# Altium footprint library Capacitance.PcbLib: 69 footprints (part 3 of 5)
Each footprint in its own frame and in the unit in brackets; x right, y up, seen from the top. Pads: shape width x height; smd on the part's side, far side on the other; paste and mask are expansions set on the pad; w line width, h text height; cw(c..) or ccw(c..) is an arc to the next point about the centre after c.
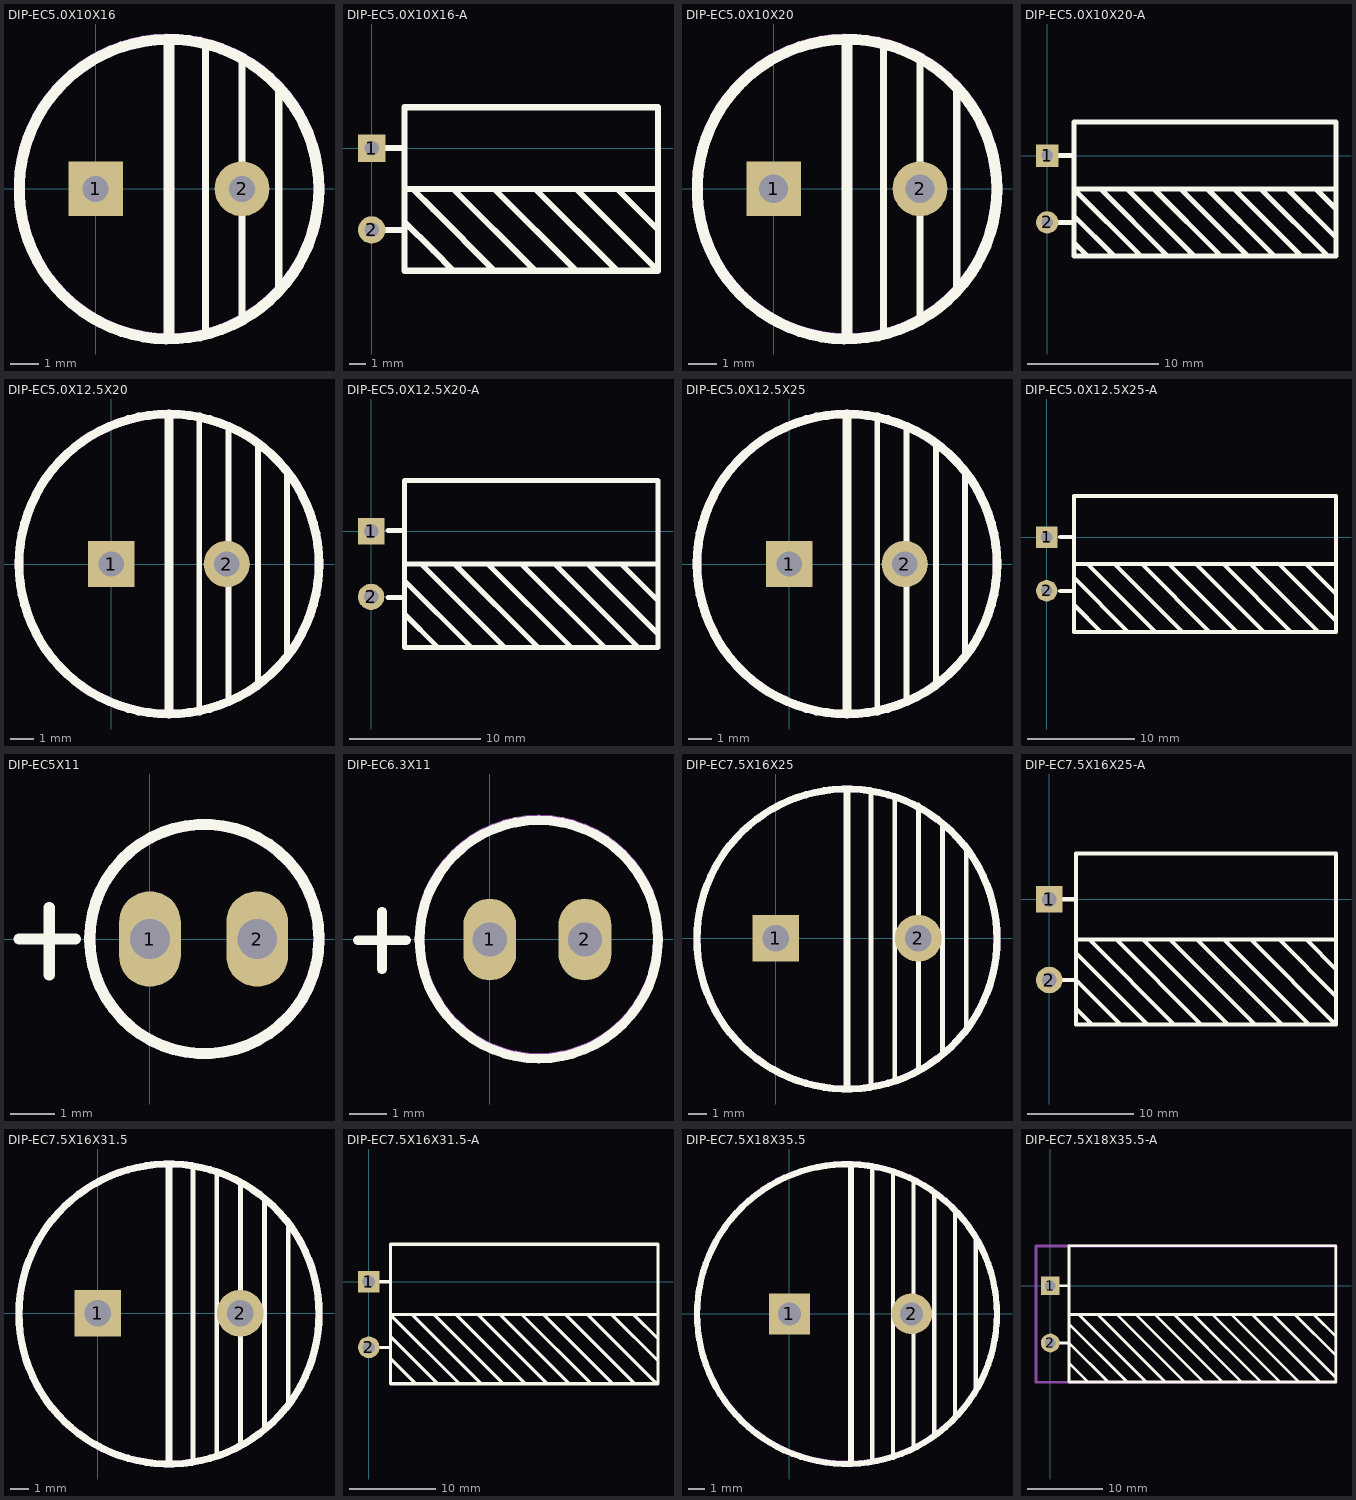
[diagram p2: the footprints below, top view; thin cyan lines are the x and y axes]

## DIP-EC5.0X10X16 [mm]
pads (2):
  rect 1.9x1.9 hole 0.9: 1(0,0)
  round 1.9 hole 0.9: 2(5.08,0)
Top Overlay:
  circle w0.381: c2.546,-0.013 r5.2
  lines w0.254: 3.81,-5.08 3.81,5.08 ; 5.08,-4.572 5.08,4.572 ; 6.35,-3.556 6.35,3.556
  lines w0.381: 2.546,-5.197 2.546,5.072 ; 2.546,-5.082 2.546,-5.075 ; 2.546,-4.07 2.546,-4.064 ; 2.546,-3.054 2.546,-3.05 2.546,-3.043 ; 2.546,-2.032 2.546,-2.038 ; 2.546,1.01 2.546,1.016 ; 2.546,2.026 2.546,2.032 ; 2.546,4.058 2.546,4.064 ; 2.546,5.074 2.546,5.187 ; 2.546,-2.038 2.546,-2.038
Bottom Courtyard:
  circle w0.381: c2.546,0 r5.2
  text ".Designator" at 10.163,-0.514 h1.52
3D body "CAP 5.0X10X16.STEP": height 16.04, standoff -3.37, extent -2.413,-4.998 7.597,4.998

## DIP-EC5.0X10X16-A [mm]
pads (2):
  rect 1.7x1.7 hole 0.9: 1(0,0)
  round 1.7 hole 0.9: 2(0,-5.08)
Top Overlay:
  lines w0.381: 0.762,-5.08 1.778,-5.08 2.032,-5.08 ; 0.762,0 1.778,0 2.032,0 ; 2.032,-4.572 3.81,-6.35 5.08,-7.62 ; 2.032,-2.54 2.54,-2.54 ; 3.81,-2.54 17.78,-2.54 ; 4.064,-2.54 2.54,-2.54 ; 5.08,-2.54 10.16,-7.62 ; 7.62,-7.62 3.81,-3.81 2.54,-2.54 ; 7.62,-2.54 12.7,-7.62 ; 10.16,-2.54 15.24,-7.62 ; 12.7,-2.54 17.78,-7.62 ; 15.24,-2.54 17.78,-5.08 ; 17.78,-7.62 17.78,2.54 2.032,2.54 2.032,-7.62 17.78,-7.62
Bottom Courtyard:
  text ".Designator" at 16.127,-3.048 h1.52
3D body "CAP 5.0X10X16-H.STEP": height 10.03, standoff -3.47, extent -0.254,-7.545 17.956,2.465

## DIP-EC5.0X10X20 [mm]
pads (2):
  rect 1.9x1.9 hole 1: 1(0,0)
  round 1.9 hole 1: 2(5.08,0)
Top Overlay:
  circle w0.381: c2.546,-0.013 r5.2
  lines w0.254: 3.81,-5.08 3.81,4.826 ; 5.08,-4.572 5.08,4.572 ; 6.35,-3.556 6.35,3.556
  lines w0.381: 2.546,-5.197 2.546,5.072 ; 2.546,-5.082 2.546,-5.075 ; 2.546,-4.07 2.546,-4.064 ; 2.546,-3.054 2.546,-3.05 2.546,-3.043 ; 2.546,-2.032 2.546,-2.038 ; 2.546,2.026 2.546,2.032 ; 2.546,4.058 2.546,4.064 ; 2.546,5.074 2.546,5.187 ; 2.546,-2.038 2.546,-2.038
Bottom Courtyard:
  circle w0.381: c2.546,0 r5.2
  text ".Designator" at 10.163,-0.514 h1.52
3D body "CAP 5.0X10X20.STEP": height 20.03, standoff -3.38, extent -2.459,-4.926 7.551,5.074

## DIP-EC5.0X10X20-A [mm]
pads (2):
  rect 1.7x1.7 hole 0.9: 1(0,0)
  round 1.7 hole 0.9: 2(0,-5.08)
Top Overlay:
  lines w0.381: 0.762,-5.08 1.778,-5.08 2.032,-5.08 ; 0.762,0 1.778,0 2.032,0 ; 2.032,-6.604 3.048,-7.62 ; 2.032,-4.572 5.08,-7.62 ; 3.81,-2.54 21.971,-2.54 ; 6.096,-2.54 11.176,-7.62 ; 7.112,-7.62 2.032,-2.54 ; 8.128,-2.54 13.208,-7.62 ; 9.144,-7.62 4.064,-2.54 2.54,-2.54 2.032,-2.54 ; 9.652,-2.54 10.16,-2.54 15.24,-7.62 ; 12.192,-2.54 17.272,-7.62 ; 14.224,-2.54 19.304,-7.62 ; 16.256,-2.54 21.336,-7.62 ; 18.288,-2.54 21.844,-6.096 ; 20.32,-2.54 20.447,-2.54 21.971,-4.064 ; 2.032,-2.54 2.032,-2.54 ; 2.032,-7.62 2.032,2.54 21.971,2.54 21.971,-7.62 2.032,-7.62
Bottom Courtyard:
  text ".Designator" at 18.222,-3.048 h1.52
3D body "CAP 5.0X10X20-H.STEP": height 10.03, standoff -3.47, extent -0.254,-7.545 21.956,2.465

## DIP-EC5.0X12.5X20 [mm]
pads (2):
  rect 2x2 hole 1.1: 1(0,0)
  round 2 hole 1.1: 2(5,0)
Top Overlay:
  circle w0.381: c2.5,0 r6.5
  lines w0.254: 3.81,-6.35 3.81,6.35 ; 5.08,-5.842 5.08,5.842 ; 6.35,-5.334 6.35,5.08 ; 7.62,-4.064 7.62,4.064
  lines w0.381: 2.5,-5.842 2.5,-6.35 2.5,6.35 ; 2.5,-5.08 2.5,-3.81 ; 2.5,-2.54 2.5,-1.778 ; 2.5,1.016 2.5,2.286 ; 2.5,3.048 2.5,4.064
Bottom Courtyard:
  circle w0.381: c2.5,0 r6.5
  text ".Designator" at 10.118,-0.508 h1.52
3D body "CAP 5.0X12.5X20.STEP": height 20.03, standoff -3.38, extent -3.81,-6.25 8.7,6.25

## DIP-EC5.0X12.5X20-A [mm]
pads (2):
  rect 2x2 hole 1.1: 1(0,0)
  round 2 hole 1.1: 2(0,-5)
Top Overlay:
  lines w0.381: 1.27,-5.04 2.54,-5.04 ; 1.27,0.04 2.54,0.04 ; 2.54,-6.31 5.08,-8.85 ; 2.54,-3.77 7.62,-8.85 ; 2.54,-2.5 21.844,-2.5 ; 3.81,-2.5 10.16,-8.85 ; 6.35,-2.5 12.7,-8.85 ; 8.89,-2.5 15.24,-8.85 ; 11.43,-2.5 17.78,-8.85 ; 13.97,-2.5 20.32,-8.85 ; 16.51,-2.5 21.844,-7.834 ; 19.05,-2.5 21.844,-5.294 ; 2.54,-8.85 21.844,-8.85 21.844,3.85 2.54,3.85 2.54,-8.85
Bottom Courtyard:
  text ".Designator" at 18.084,-3.008 h1.52
3D body "CAP 5.0X12.5X20-H.STEP": height 12.53, standoff -3.47, extent -0.381,-8.668 21.829,3.842

## DIP-EC5.0X12.5X25 [mm]
pads (2):
  rect 2x2 hole 1.1: 1(0,0)
  round 2 hole 1.1: 2(5,0)
Top Overlay:
  circle w0.381: c2.5,0 r6.5
  lines w0.254: 3.81,-6.35 3.81,6.35 ; 5.08,-5.842 5.08,5.842 ; 6.35,-5.334 6.35,5.08 ; 7.62,-4.064 7.62,4.064
  lines w0.381: 2.5,-5.842 2.5,-6.35 2.5,6.35 ; 2.5,-5.08 2.5,-3.81 ; 2.5,-2.54 2.5,-1.778 ; 2.5,1.016 2.5,2.286 ; 2.5,3.048 2.5,4.064
Bottom Courtyard:
  circle w0.381: c2.5,0 r6.5
  text ".Designator" at 10.118,-0.508 h1.52
3D body "CAP 5.0X12.5X25.STEP": height 25.04, standoff -3.37, extent -3.81,-6.248 8.7,6.248

## DIP-EC5.0X12.5X25-A [mm]
pads (2):
  rect 2x2 hole 1.1: 1(0,0)
  round 2 hole 1.1: 2(0,-5)
Top Overlay:
  lines w0.381: 1.27,-5.04 2.54,-5.04 ; 1.27,0.04 2.54,0.04 ; 2.54,-6.31 5.08,-8.85 ; 2.54,-3.77 7.62,-8.85 ; 2.54,-2.5 27.051,-2.5 ; 3.81,-2.5 10.16,-8.85 ; 6.35,-2.5 12.7,-8.85 ; 8.89,-2.5 15.24,-8.85 ; 11.43,-2.5 17.78,-8.85 ; 13.97,-2.5 20.32,-8.85 ; 16.51,-2.5 22.86,-8.85 ; 19.05,-2.5 25.4,-8.85 ; 21.717,-2.5 27.051,-7.834 ; 24.257,-2.5 27.051,-5.294 ; 2.54,-8.85 27.051,-8.85 27.051,3.85 2.54,3.85 2.54,-8.85
Bottom Courtyard:
  text ".Designator" at 20.687,-3.008 h1.52
3D body "CAP 5.0X12.5X25-H.STEP": height 12.53, standoff -3.47, extent -0.381,-8.795 26.829,3.715

## DIP-EC5X11 [mil]
pads (2):
  oval 55x85 hole 35.43: 1(0,0) 2(95.5,0)
Top Overlay:
  circle w10: c48.5,0 r102.02
  lines w10: -116.5,0 -66.5,0 ; -89.5,-32 -89.5,28
Bottom Courtyard:
  circle w10: c48.5,0 r102.02
  text ".Designator" at 317.54,-22.11 h60
3D body "CAP_5×11.STEP": height 491.5, standoff -158.11, extent -59.77,-111.24 156.77,105.24

## DIP-EC6.3X11 [mil]
pads (2):
  oval 55x85 hole 35.43: 1(0,0) 2(99,0)
Top Overlay:
  circle w10: c51,0 r124.02
  lines w10: -137,-1 -87,-1 ; -112,-31 -112,29
Bottom Courtyard:
  circle w10: c51,1 r124.02
  text ".Designator" at 321.26,-21 h60
3D body "Cap_D63H110.STEP": height 492.13, standoff -118.11, extent -81.86,-134.45 184.71,132.44

## DIP-EC7.5X16X25 [mm]
pads (2):
  rect 2.5x2.5 hole 1.4: 1(0,0)
  round 2.5 hole 1.4: 2(7.6,0)
Top Overlay:
  circle w0.381: c3.8,-0.038 r8
  lines w0.254: 5.08,-7.874 5.08,7.874 ; 6.35,-7.62 6.35,7.62 ; 7.62,-7.112 7.62,7.112 ; 8.89,-6.096 8.89,6.096 ; 10.16,-4.826 10.16,4.826
  lines w0.381: 3.8,-8.001 3.8,7.925
Bottom Courtyard:
  circle w0.381: c3.8,-0.038 r8
  text ".Designator" at 11.418,-0.546 h1.52
3D body "CAP 7.5X16X25.STEP": height 25.03, standoff -3.38, extent -4.191,-7.998 11.819,7.998

## DIP-EC7.5X16X25-A [mm]
pads (2):
  rect 2.5x2.5 hole 1.4: 1(0,0)
  round 2.5 hole 1.4: 2(0,-7.6)
Top Overlay:
  lines w0.381: 1.232,-7.61 2.502,-7.61 6.693,-11.801 ; 1.232,0.01 2.502,0.01 ; 2.502,-10.277 4.026,-11.801 ; 2.502,-5.07 9.233,-11.801 ; 2.502,-3.8 27.013,-3.8 ; 3.772,-3.8 11.773,-11.801 ; 6.312,-3.8 14.313,-11.801 ; 8.852,-3.8 16.853,-11.801 ; 11.392,-3.8 19.393,-11.801 ; 13.932,-3.8 21.869,-11.738 ; 16.472,-3.8 24.409,-11.738 ; 19.012,-3.8 26.941,-11.729 ; 21.679,-3.8 27.013,-9.134 ; 24.219,-3.8 27.013,-6.594 ; 2.502,-11.801 2.502,4.328 27.013,4.328 27.013,-11.801 2.502,-11.801
Bottom Courtyard:
  text ".Designator" at 20.543,-4.244 h1.52
3D body "CAP 7.5X16X25-H.STEP": height 16.03, standoff -3.47, extent -0.508,-11.688 26.902,4.322

## DIP-EC7.5X16X31.5 [mm]
pads (2):
  rect 2.5x2.5 hole 1.4: 1(0,0)
  round 2.5 hole 1.4: 2(7.6,0)
Top Overlay:
  circle w0.381: c3.8,-0.038 r8
  lines w0.254: 5.08,-7.874 5.08,7.874 ; 6.35,-7.62 6.35,7.62 ; 7.62,-7.112 7.62,6.858 ; 8.89,-6.096 8.89,6.096 ; 10.16,-4.826 10.16,4.572
  lines w0.381: 3.8,-8.001 3.8,7.925
Bottom Courtyard:
  circle w0.381: c3.8,-0.038 r8
  text ".Designator" at 11.418,-0.546 h1.52
3D body "CAP 7.5X16X31.5.STEP": height 31.53, standoff -3.38, extent -4.191,-7.872 11.819,8.126

## DIP-EC7.5X16X31.5-A [mm]
pads (2):
  rect 2.5x2.5 hole 1.4: 1(0,0)
  round 2.5 hole 1.4: 2(0,-7.6)
Top Overlay:
  lines w0.381: 1.232,-7.61 2.502,-7.61 ; 1.232,0.01 2.502,0.01 ; 2.502,-8.88 5.423,-11.801 ; 2.502,-6.34 7.963,-11.801 ; 5.042,-3.8 13.043,-11.801 ; 7.582,-3.8 15.519,-11.738 ; 10.122,-3.8 18.059,-11.738 ; 10.503,-11.801 2.502,-3.8 33.49,-3.8 ; 12.662,-3.8 20.599,-11.738 ; 15.202,-3.8 23.139,-11.738 ; 17.742,-3.8 25.679,-11.738 ; 20.282,-3.8 28.219,-11.738 ; 22.822,-3.8 30.759,-11.738 ; 25.362,-3.8 33.291,-11.729 ; 28.156,-3.8 33.49,-9.134 ; 30.696,-3.8 33.49,-6.594 ; 2.502,-11.801 2.502,4.328 33.49,4.328 33.49,-11.801 2.502,-11.801
Bottom Courtyard:
  text ".Designator" at 23.782,-4.244 h1.52
3D body "CAP 7.5X16X31.5-H.STEP": height 16.03, standoff -3.47, extent -0.508,-11.688 33.402,4.322

## DIP-EC7.5X18X35.5 [mm]
pads (2):
  rect 2.5x2.5 hole 1.4: 1(0,0)
  round 2.5 hole 1.4: 2(7.5,0)
Top Overlay:
  circle w0.381: c3.532,-0.013 r9.2
  lines w0.254: 5.08,-8.89 5.08,9.144 ; 6.35,-8.636 6.35,8.636 ; 7.62,-8.128 7.62,8.128 ; 8.89,-7.366 8.89,7.366 ; 10.16,-6.35 10.16,6.35 ; 11.43,-4.826 11.43,4.572
  lines w0.381: 3.78,-9.144 3.78,9.144
Bottom Courtyard:
  circle w0.381: c3.532,0 r9.2
  text ".Designator" at 11.149,-0.514 h1.52
3D body "CAP 7.5X18X35.5.STEP": height 35.54, standoff -3.37, extent -5.334,-9 12.676,9

## DIP-EC7.5X18X35.5-A [mm]
pads (2):
  rect 2.5x2.5 hole 1.4: 1(0,0)
  round 2.5 hole 1.4: 2(0,-7.6)
Top Overlay:
  lines w0.381: 1.232,-7.61 2.502,-7.61 7.697,-12.805 ; 1.232,0.01 2.502,0.01 ; 2.502,-10.277 5.013,-12.789 ; 2.502,-5.07 10.227,-12.795 ; 2.502,-3.8 37.942,-3.8 ; 3.772,-3.8 12.727,-12.755 ; 6.312,-3.8 15.287,-12.775 ; 8.852,-3.8 17.817,-12.765 ; 11.392,-3.8 20.377,-12.785 ; 13.932,-3.8 22.907,-12.775 ; 16.472,-3.8 25.437,-12.765 ; 19.012,-3.8 27.997,-12.785 ; 21.552,-3.8 30.527,-12.775 ; 24.092,-3.8 33.057,-12.765 ; 26.842,-3.8 35.812,-12.77 ; 29.582,-3.82 37.922,-12.16 ; 32.559,-3.86 37.893,-9.194 ; 35.099,-3.86 37.893,-6.654 ; 2.502,-12.8 2.502,5.32 37.942,5.32 37.942,-12.8 2.502,-12.8
Bottom Courtyard:
  lines w0.381: -1.905,-12.81 37.98,-12.81 37.98,5.31 -1.905,5.31 -1.905,-12.81
  text ".Designator" at 25.655,-4.253 h1.52
3D body "CAP 7.5X18X35.5-H.STEP": height 18.03, standoff -3.47, extent -0.508,-12.815 37.902,5.195